# Altium footprint library Switch$.PcbLib: 117 footprints (part 1 of 8)
Each footprint in its own frame and in the unit in brackets; x right, y up, seen from the top. Pads: shape width x height; smd on the part's side, far side on the other; paste and mask are expansions set on the pad; w line width, h text height; cw(c..) or ccw(c..) is an arc to the next point about the centre after c.
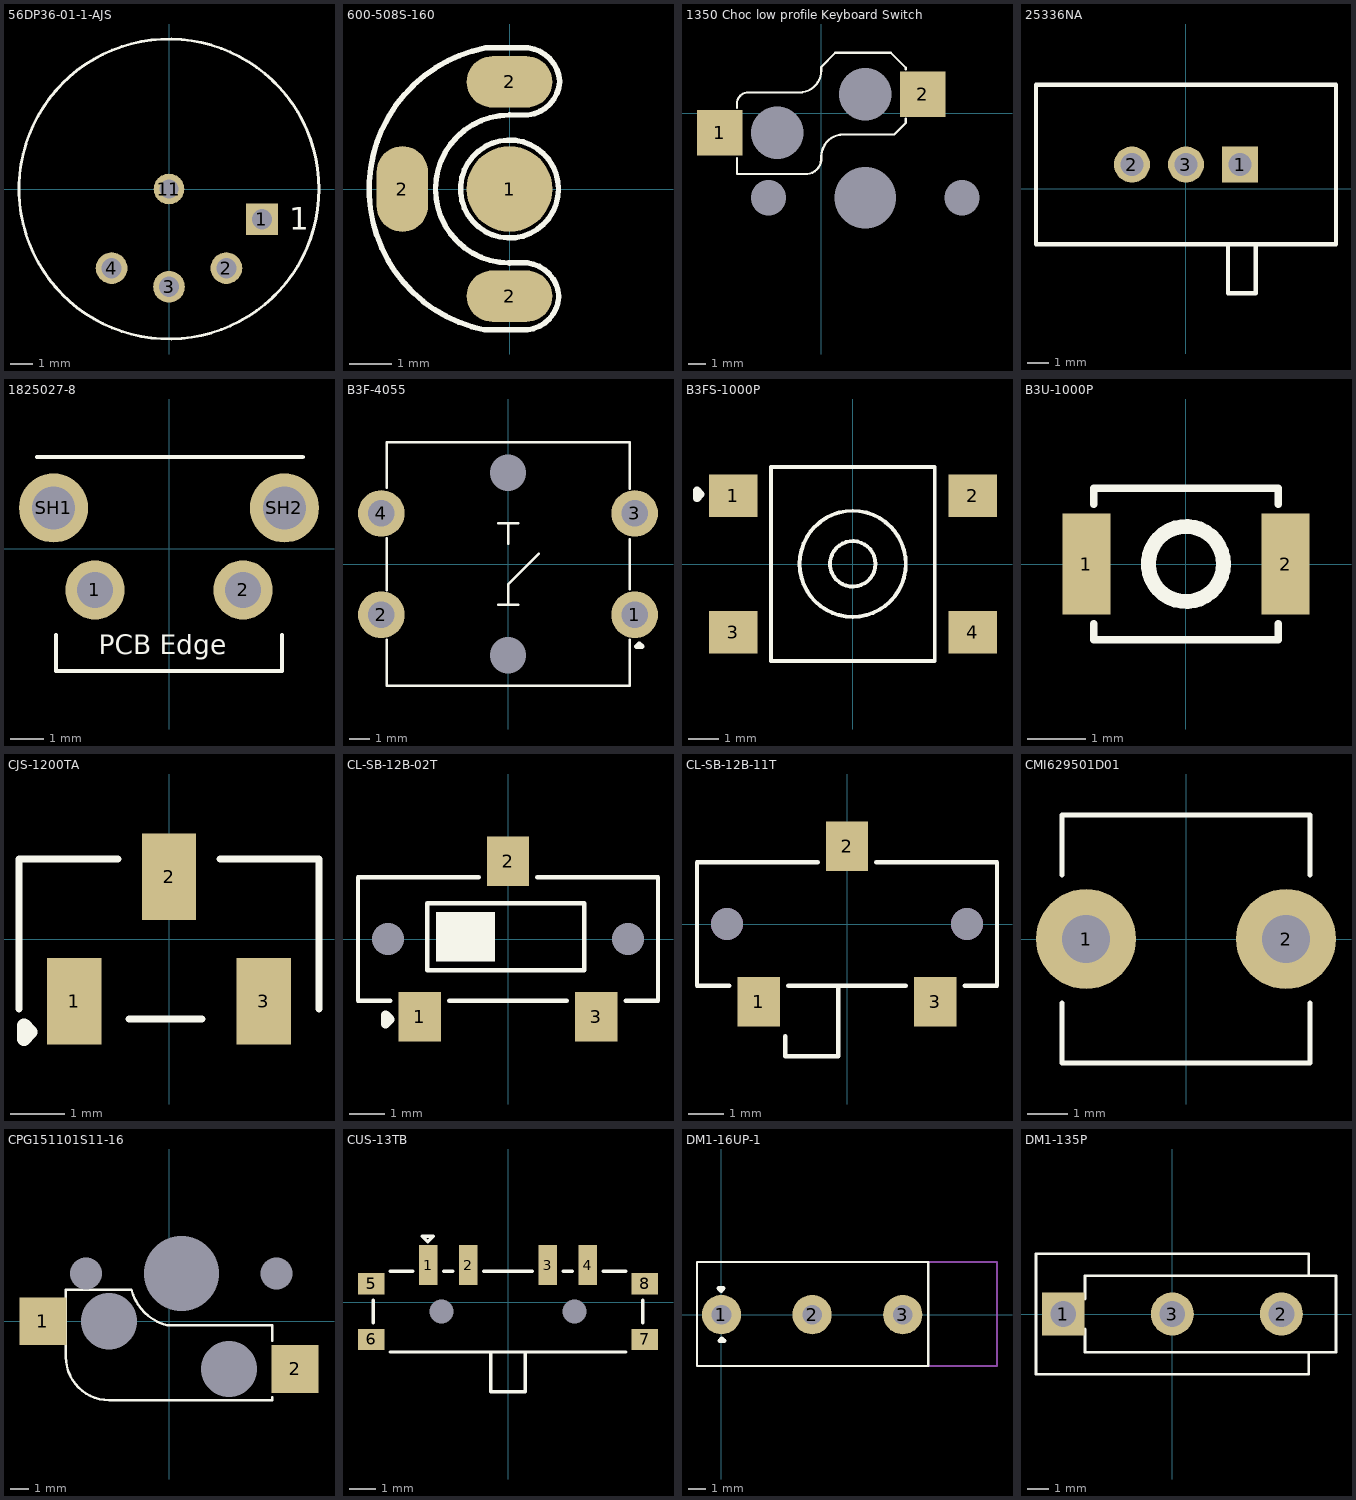
[diagram p0: the footprints below, top view; thin cyan lines are the x and y axes]

## 56DP36-01-1-AJS [mm]
pads (5):
  rect 1.4x1.4 hole 0.9 paste-2539.97 mask+0: 1(4.109,-1.335)
  round 1.4 hole 0.9 paste-2539.97 mask+0: 2(2.539,-3.495) 3(0,-4.32) 4(-2.539,-3.495)
  round 1.35 hole 0.85 paste-2539.97 mask+0: 11(0,0)
Top Overlay:
  circle w0.127: c0,0 r6.629
  text "1" at 5.305,-1.807 h1
3D body "56dp.STEP": height 26.9, standoff -3, extent -6.352,-6.36 6.348,6.36

## 600-508S-160 [mm]
pads (4):
  round 2 smd: 1(0,0)
  oval 1.2x2 smd: 2(-2.5,0)
  oval 2x1.2 smd: 2(0,-2.5) 2(0,2.5)
Top Overlay:
  circle w0.127: c0,0 r1.143
  lines w0.127: -0.02,-1.724 0.412,-1.723 cw(c0.315,-2.557) 1.152,-2.499 ; 0,-1.727 cw(c0,0) 0,1.727 0.432,1.727 ccw(c0.335,2.561) 1.172,2.503 ; 1.152,-2.513 cw(c0.315,-2.455) 0.412,-3.289 -0.577,-3.289 cw(c0.076,0) -0.557,3.293 0.432,3.293 cw(c0.335,2.459) 1.172,2.517

## 1350 Choc low profile Keyboard Switch [mm]
pads (7):
  rect 2.6x2.6 smd paste+0 mask+0.05: 1(-5.775,-1.1) 2(5.775,1.1)
  round 0 hole 2 unplated: MH(-3,-4.8) MH(8,-4.8)
  round 0 hole 3 unplated: MH(-2.5,-1.1) MH(2.5,1.1)
  round 0 hole 3.5 unplated: MH(2.5,-4.8)
Top Overlay:
  lines w0.127: -4.801,-2.54 -4.801,-3.449 -0.8,-3.449 ; -4.8,0.33 -4.8,0.55 cw(c-4.15,0.55) -4.15,1.2 ; -4.15,1.2 -1.25,1.2 ccw(c-1.25,2.45) 0,2.45 0,2.65 0.8,3.45 3.95,3.45 4.8,2.6 4.8,2.515 ; -0.8,-3.45 ccw(c-0.888,-2.562) 0.001,-2.649 ; 0,-2.65 0,-2.45 cw(c1.25,-2.45) 1.25,-1.2 4.15,-1.2 ; 4.8,-0.305 4.8,-0.55 4.15,-1.2 ; 4.15,-1.2 4.15,-1.2
Bottom Overlay:
  lines w0.127: -5,-12.3 -5,2.7 10,2.7 10,-12.3 -5,-12.3
3D body "1350.STEP": height 8.8, standoff -2.33, extent -6.5,-12.35 10,3.475

## 25336NA [mm]
height 2.95
pads (3):
  rect 1.7x1.7 hole 1.1 paste-2539.97 mask+0: 1(2.54,1.15)
  round 1.7 hole 1.1 paste-2539.97 mask+0: 2(-2.54,1.15) 3(0,1.15)
Top Overlay:
  lines w0.2: -7.05,-2.6 -7.05,4.9 7.05,4.9 7.05,-2.6 -7.05,-2.6 ; 1.975,-4.9 1.975,-2.6 3.275,-2.6 3.275,-4.9 1.975,-4.9
3D body "Switch_Apem_Inc_25336NA_eec.STEP": height 8.1, standoff -3.8, extent -7.05,-4.86 7.051,4.94

## 1825027-8 [mm]
pads (4):
  round 1.8 hole 1.1: 1(-2.25,-1.245) 2(2.25,-1.245)
  round 2.1 hole 1.3: SH1(-3.505,1.245) SH2(3.505,1.245)
Top Overlay:
  lines w0.127: -4.013,2.794 4.064,2.794 ; -3.429,-2.616 -3.429,-3.708 3.429,-3.708 3.429,-2.616
  text "PCB Edge" at -2.134,-3.394 h1
3D body "c-1825027-8-h-3d.stp": height 8, standoff -2.52, extent -4.178,-7.112 4.229,2.73

## B3F-4055 [mm]
pads (6):
  round 2.3 hole 1.3 paste-2539.97 mask+0.051: 1(6.25,-2.5) 2(-6.25,-2.5) 3(6.25,2.5) 4(-6.25,2.5)
  round 0 hole 1.8 unplated paste-2539.97 mask+0.051: MH(0,-4.5) MH(0,4.5)
Top Overlay:
  lines w0.127: -5.99,-3.731 -5.99,-5.997 6.01,-5.997 6.01,-3.73 ; -5.99,-1.287 -5.99,1.26 ; -5.99,3.757 -5.99,6.003 6.01,6.003 6.01,3.72 ; -0.49,-1.997 0.51,-1.997 ; -0.49,2.003 0.51,2.003 ; 0.01,-1.997 0.01,-0.997 1.51,0.503 ; 0.01,1.003 0.01,2.003 ; 6.01,-1.244 6.01,1.227
  lines w0.254: 6.35,-4.064 6.604,-4.064 6.477,-3.937 6.35,-4.064
3D body "125.step": height 8.52, standoff -3.3, extent -7.045,-5.998 7.045,6.003

## B3FS-1000P [mm]
pads (4):
  rect 1.6x1.4 smd: 1(-3.95,2.25) 2(3.95,2.25) 3(-3.95,-2.25) 4(3.95,-2.25)
Top Overlay:
  circle w0.127: c-0.007,0.005 r0.749
  circle w0.127: c-0.007,0.005 r1.75
  lines w0.127: -2.7,-3.2 2.7,-3.2 2.7,3.2 -2.7,3.2 -2.7,-3.2
  lines w0.254: -5.142,2.169 -5.142,2.423 -5.015,2.296 -5.142,2.169
3D body "b3fs-1000p.stp": height 3.1, standoff 0, extent -4,-3.15 4,3.15

## B3U-1000P [mm] "SWITCH TACTILE SPST-NO 0.05A 12V"
pads (2):
  rect 0.82x1.72 smd: 1(-1.7,0) 2(1.7,0)
Top Overlay:
  circle w0.254: c0,0 r0.641
  lines w0.127: -1.575,-1.016 -1.575,-1.295 1.575,-1.295 1.575,-1.016 ; -1.575,1.016 -1.575,1.295 1.575,1.295 1.575,1.016
3D body "User Library-OMRON B3U1000P.step": height 1.6, standoff 0, extent -2,-1.263 2,1.237

## CJS-1200TA [mm]
pads (3):
  rect 1x1.6 smd: 1(-1.75,-1.15) 2(0,1.15) 3(1.75,-1.15)
Top Overlay:
  lines w0.127: -2.769,-1.295 -2.769,1.473 -0.94,1.473 ; -0.737,-1.473 0.61,-1.473 ; 0.94,1.473 2.769,1.473 2.769,-1.295
  lines w0.254: -2.678,-1.844 -2.551,-1.717 -2.678,-1.59 -2.678,-1.844
3D body "CJS-1200TA.step": height 2.5, standoff 0, extent -2.7,-1.4 2.7,1.4

## CL-SB-12B-02T [mm]
pads (5):
  rect 1.2x1.4 smd paste+0 mask+0.051: 1(-2.5,-2.2) 2(0,2.2) 3(2.5,-2.2)
  round 0 hole 0.9 unplated: ""(-3.4,0) ""(3.4,0)
Top Overlay:
  region: -2.032,0.762 -0.381,0.762 -0.381,-0.635 -2.032,-0.635
  lines w0.127: -3.331,-1.75 -4.25,-1.75 -4.25,1.75 -0.831,1.75 ; -1.669,-1.75 1.669,-1.75 ; 0.831,1.75 4.25,1.75 4.25,-1.75 3.331,-1.75 ; -2.286,-0.889 2.159,-0.889 2.159,1.016 -2.286,1.016 -2.286,-0.889
  lines w0.254: -3.465,-2.403 -3.465,-2.149 -3.338,-2.276 -3.465,-2.403
3D body "CL-SB-12B-02T.stp": height 5.5, standoff -0.8, extent -4.25,-2.5 4.25,2.5

## CL-SB-12B-11T [mm]
pads (5):
  rect 1.2x1.4 smd: 1(-2.5,-2.2) 2(0,2.2) 3(2.5,-2.2)
  round 0 hole 0.9 unplated: ""(-3.4,0) ""(3.4,0)
Top Overlay:
  lines w0.127: -3.331,-1.75 -4.25,-1.75 -4.25,1.75 -0.831,1.75 ; -1.75,-3.175 -1.75,-3.75 -0.25,-3.75 -0.25,-1.75 ; -1.669,-1.75 1.669,-1.75 ; 0.831,1.75 4.25,1.75 4.25,-1.75 3.331,-1.75
Keep-Out Layer:
  board cut-out: -2.95,0 -2.951,0.089 -3.021,0.252 -3.147,0.377 -3.311,0.444 -3.489,0.444 -3.653,0.377 -3.779,0.252 -3.849,0.089 -3.85,0 -3.849,-0.089 -3.779,-0.252 -3.653,-0.377 -3.489,-0.444 -3.311,-0.444 -3.147,-0.377 -3.021,-0.252 -2.951,-0.089
  board cut-out: 3.85,0 3.849,0.089 3.779,0.252 3.653,0.377 3.489,0.444 3.311,0.444 3.147,0.377 3.021,0.252 2.951,0.089 2.95,0 2.951,-0.089 3.021,-0.252 3.147,-0.377 3.311,-0.444 3.489,-0.444 3.653,-0.377 3.779,-0.252 3.849,-0.089
3D body "C2921649.step": height 3.5, standoff -0.8, extent -4.25,-3.726 4.25,2.524

## CMI629501D01 [mm]
pads (2):
  round 2.5 hole 1.2: 1(-2.5,0) 2(2.5,0)
Top Overlay:
  lines w0.127: -3.1,-1.6 -3.1,-3.1 3.1,-3.1 3.1,-1.6 ; -3.1,1.6 -3.1,3.1 3.1,3.1 3.1,1.6
3D body "mouse button.STEP": height 9.5, standoff -3.3, extent -3.1,-3.1 3.1,3.1

## CPG151101S11-16 [mm]
pads (7):
  rect 2.5x2.55 smd paste+0 mask+0.05: 1(-6.725,0) 2(6.725,-2.54)
  round 0 hole 1.702 unplated paste-2539.97: ""(-4.42,2.54) ""(5.74,2.54)
  round 0 hole 3 unplated paste-2539.97: ""(-3.2,0) ""(3.2,-2.54)
  round 0 hole 3.988 unplated paste-2539.97: ""(0.66,2.54)
Top Overlay:
  lines w0.127: -3.196,-4.21 cw(c-3.196,-1.906) -5.5,-1.906 -5.5,1.506 -5.5,1.68 -2,1.68 ccw(c0.569,2.349) -0.1,-0.22 0.15,-0.22 1.19,-0.22 5.5,-0.22 5.5,-0.47 ; -3.186,-4.22 5.5,-4.22 ; 5.49,-4.21 cw(c5.49,-4.22) 5.5,-4.22 ; 5.5,-4.046 5.5,-4.22 ; 5.5,-1.034 5.5,-0.47 ; 5.5,-0.47 5.5,-0.47
3D body "MX1A-11NW.stp": height 14.63, standoff -3.27, extent -7.097,-5.212 8.403,10.288
3D body "C41430893.step": height 1.85, standoff -1.2, extent -7.4,-4.215 7.4,1.675

## CUS-13TB [mm]
pads (10):
  rect 0.7x1.5 smd paste+0 mask+0.051: 1(-3,1.4) 2(-1.5,1.4) 3(1.5,1.4) 4(3,1.4)
  rect 1x0.8 smd paste+0 mask+0.051: 5(-5.15,0.7) 6(-5.15,-1.4) 7(5.15,-1.4) 8(5.15,0.7)
  round 0 hole 0.9 unplated paste-2539.97: ""(-2.5,-0.35) ""(2.5,-0.35)
Top Overlay:
  lines w0.127: -5.08,-0.769 -5.08,0.069 ; -4.431,-1.874 4.431,-1.874 ; -4.431,1.174 -3.581,1.174 ; -2.419,1.174 -2.081,1.174 ; -0.919,1.174 0.919,1.174 ; -0.65,-1.874 -0.65,-3.374 0.65,-3.374 0.65,-1.874 ; 2.081,1.174 2.419,1.174 ; 3.581,1.174 4.431,1.174 ; 5.08,-0.769 5.08,0.069 ; -3.226,2.489 -3.023,2.286 -2.819,2.489 -3.226,2.489
3D body "C2921740.step": height 1.41, standoff -0.5, extent -5.35,-3.112 5.35,1.888

## DM1-16UP-1 [mm]
pads (3):
  round 2.2 hole 1.1: 1(0,0) 2(5.08,0) 3(10.16,0)
Top Overlay:
  lines w0.127: -1.372,-2.87 -1.372,2.946 11.582,2.946 11.582,-2.87 -1.372,-2.87
  lines w0.254: -0.152,1.473 -0.025,1.346 0.102,1.473 -0.152,1.473 ; -0.102,-1.473 0.025,-1.346 0.152,-1.473 -0.102,-1.473
Mechanical 13:
  lines w0.127: 11.582,-2.87 15.443,-2.87 15.443,2.946 11.582,2.946
  text "Button Strip Area" at 13.752,-2.591 h0.8
3D body "Microswitch_SPDT_Vertical.step": height 11.24, standoff -1.85, extent -1.32,-2.9 15.465,2.9

## DM1-135P [mm]
pads (3):
  rect 2x2 hole 1.2 paste-2539.97 mask+0.051: 1(-5.08,0)
  round 2 hole 1.2 paste-2539.97 mask+0.051: 2(5.08,0) 3(0,0)
Top Overlay:
  lines w0.127: -4.064,-0.693 -4.064,-1.778 7.62,-1.778 7.62,1.778 -4.064,1.778 -4.064,0.693 ; 6.35,-1.778 6.35,-2.8 -6.35,-2.8 -6.35,2.8 6.35,2.8 6.35,1.778
3D body "C480264.step": height 10.5, standoff -1.6, extent -6.371,-2.9 7.645,2.901